# Altium schematic symbol library TPS7A2030PDBVRG4.SchLib: 1 symbol
Pins are listed as number, name and electrical type; pins without a type are passive.

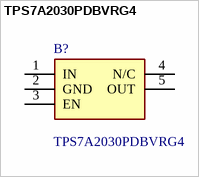
[diagram p0: symbol TPS7A2030PDBVRG4]

## TPS7A2030PDBVRG4
designator B?
Linear Voltage Regulator IC Positive Fixed 1 Output 300mA SOT-23-5; Manufacturer_Name: Texas Instruments; Geometry.Height: 1.45mm; Mouser Part Number: 595-TPS7A2030PDBVRG4; Mouser Price/Stock: https://www.mouser.co.uk/ProductDetail/Texas-Instruments/TPS7A2030PDBVRG4?qs=vOcB1WHNNXIjJi2qzfzGtA%3D%3D; Manufacturer_Part_Number: TPS7A2030PDBVRG4; Datasheet Link: https://www.ti.com/lit/ds/symlink/tps7a20.pdf?ts=1744607963693&ref_url=https%253A%252F%252Fwww.ti.com%252Fproduct%252FTPS7A20%252Fpart-details%252FTPS7A2018PDQNR
footprint SOT95P280X145-5N
pins: 1 IN, 2 GND, 3 EN, 4 N/C, 5 OUT